# Altium schematic symbol library 6130XX11121_61300611121.SchLib: 1 symbol
Pins are listed as number, name and electrical type; pins without a type are passive.

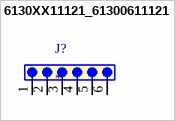
[diagram p0: symbol 6130XX11121_61300611121]

## 6130XX11121_61300611121
designator J?
CONN HEADER VERT 6POS 2.54MM; MF: {'manufacturer': u'Wurth Electronics'}; MP: 61300611121; Package: None; Price: None; Value: *; Availability: Unavailable; ComponentLink1Description: Digikey link; ComponentLink1URL: https://www.digikey.com/en/products/detail/w-rth-elektronik/61300611121/4846833?gclsrc=aw.ds&gad_source=1&gad_campaignid=20234014242&gbraid=0AAAAADrbLljw5Bgv354sk47fhk-NFREe6&gclid=CjwKCAjw6f3RBhApEiwAMaCqWaZqQffHSuqll-3JcSdKoETOUM6w5Wy-QyWzmqcpQF3crZTU-0RsBRoC5DEQAvD_BwE
footprint 61300611121
footprint 61300611121 (Pin Header, pitch 2.54 mm, THT, Vertical, single row, 6p)
pins: 1, 2, 3, 4, 5, 6